# Altium footprint library Electromechanicals.PcbLib: 25 footprints (part 2 of 2)
Each footprint in its own frame and in the unit in brackets; x right, y up, seen from the top. Pads: shape width x height; smd on the part's side, far side on the other; paste and mask are expansions set on the pad; w line width, h text height; cw(c..) or ccw(c..) is an arc to the next point about the centre after c.
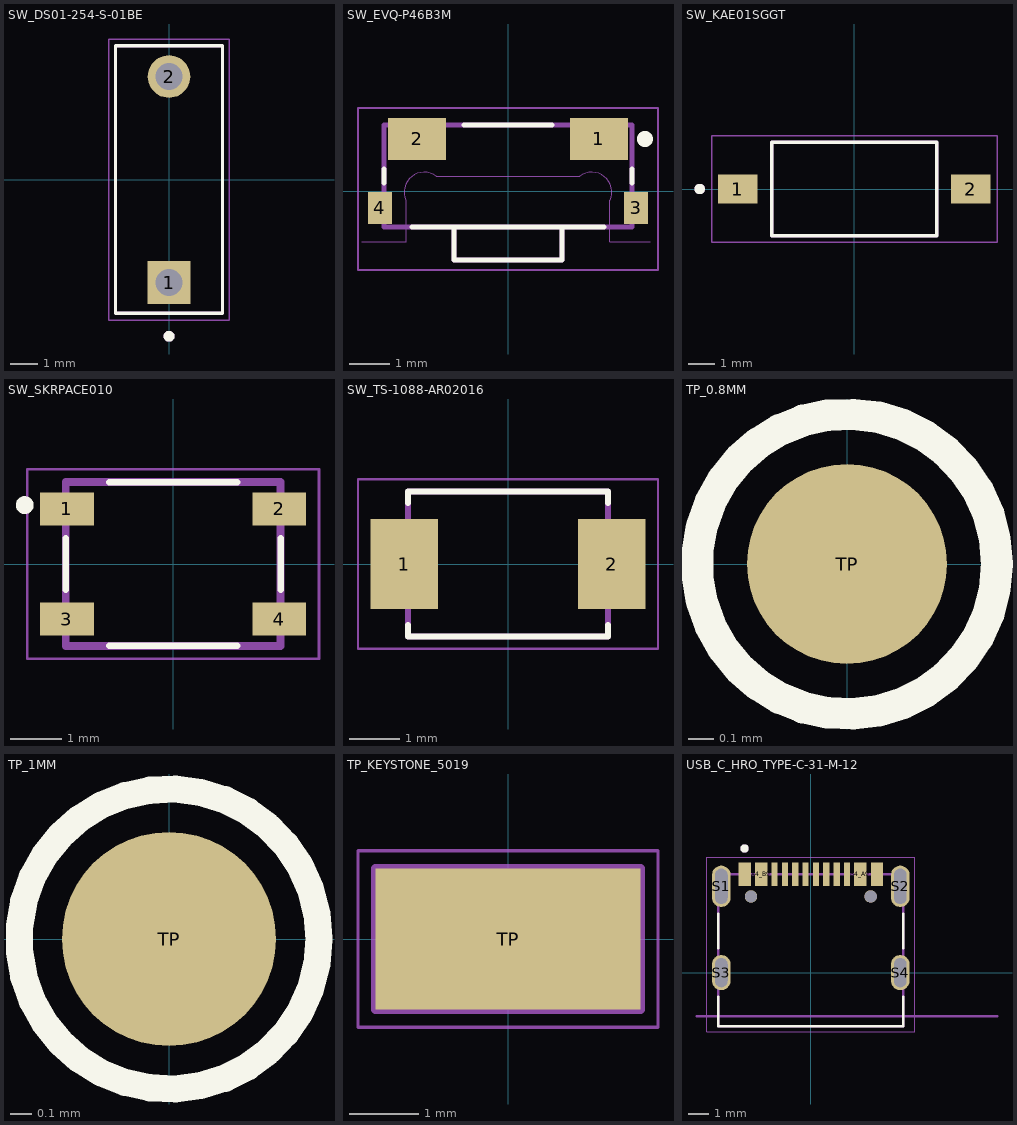
[diagram p1: the footprints below, top view; thin cyan lines are the x and y axes]

## SW_DS01-254-S-01BE [mm]
height 7
pads (2):
  rect 1.58x1.58 / inner round 1.58 / far side rect 1.58x1.58 hole 1: 1(0,-3.81)
  round 1.58 hole 1: 2(0,3.81)
Top Overlay:
  circle w0.2: c0,-5.8 r0.1
  lines w0.127: -1.98,-4.95 1.98,-4.95 1.98,4.95 -1.98,4.95 -1.98,-4.95
Mechanical 13:
  circle w0.2: c0,-5.8 r0.1
  lines w0.127: -1.98,-4.95 1.98,-4.95 1.98,4.95 -1.98,4.95 -1.98,-4.95
Mechanical 15:
  lines w0.05: -2.23,-5.2 2.23,-5.2 2.23,5.2 -2.23,5.2 -2.23,-5.2
3D body "step_temp.STEP": height 6.56, standoff -2.99, extent -1.98,-4.95 1.98,4.95

## SW_EVQ-P46B3M [mm]
pads (4):
  rect 1.45x1.05 smd: 1(2.275,1.305) 2(-2.275,1.305)
  rect 0.6x0.8 smd: 3(3.2,-0.42) 4(-3.2,-0.42)
Top Overlay:
  circle w0.2: c3.424,1.305 r0.1
  lines w0.127: -3.1,0.205 -3.1,0.555 ; -2.4,-0.895 2.4,-0.895 ; -1.35,-0.945 -1.35,-1.72 1.35,-1.72 1.35,-0.945 ; -1.1,1.655 1.1,1.655 ; 3.1,0.205 3.1,0.555
Mechanical 1:
  lines w0.01: -3.65,-1.27 -2.55,-1.27 -2.55,-0.23 ; -2.55,-0.229 cw(c-2.093,-0.025) -1.799,0.379 1.8,0.38 cw(c2.093,-0.025) 2.55,-0.229 ; 2.55,-0.23 2.55,-1.27 3.55,-1.27
Mechanical 13:
  lines w0.127: -1.35,-0.895 -1.35,-1.72 1.35,-1.72 1.35,-0.895 ; -3.1,-0.895 -3.1,1.655 3.1,1.655 3.1,-0.895 -3.1,-0.895
Mechanical 15:
  lines w0.05: -3.75,-1.97 -3.75,2.08 3.75,2.08 3.75,-1.97 -3.75,-1.97

## SW_KAE01SGGT [mm]
height 3.13
pads (2):
  rect 1.5x1.1 smd: 1(-4.45,0) 2(4.45,0)
Top Overlay:
  circle w0.2: c-5.91,0 r0.1
  lines w0.127: -3.15,-1.79 3.15,-1.79 3.15,1.79 -3.15,1.79 -3.15,-1.79
Mechanical 13:
  circle w0.2: c-5.91,0 r0.1
  lines w0.127: -3.15,-1.79 3.15,-1.79 3.15,1.79 -3.15,1.79 -3.15,-1.79
Mechanical 15:
  lines w0.05: -5.45,-2.04 5.45,-2.04 5.45,2.04 -5.45,2.04 -5.45,-2.04
3D body "step_temp.STEP": height 3.13, standoff 0, extent -4.9,-1.79 4.9,1.79

## SW_SKRPACE010 [mm]
pads (4):
  rect 1.05x0.65 smd: 1(-2.075,1.075) 2(2.075,1.075) 3(-2.075,-1.075) 4(2.075,-1.075)
Top Overlay:
  circle w0.127: c-2.85,1.15 r0.05
  circle w0.127: c-2.9,1.15 r0.112
  lines w0.127: -2.1,-0.5 -2.1,0.5 ; -1.25,-1.6 1.25,-1.6 ; -1.25,1.6 1.25,1.6 ; 2.1,-0.5 2.1,0.5
Mechanical 13:
  lines w0.152: -2.1,-1.6 -2.1,1.6 2.1,1.6 2.1,-1.6 -2.1,-1.6
Mechanical 15:
  lines w0.05: -2.85,-1.85 -2.85,1.85 2.85,1.85 2.85,-1.85 -2.85,-1.85

## SW_TS-1088-AR02016 [mm]
height 2
pads (2):
  rect 1.35x1.8 smd: 1(-2.075,0) 2(2.075,0)
Top Overlay:
  lines w0.127: -2,-1.22 -2,-1.45 2,-1.45 2,-1.22 ; -2,1.22 -2,1.45 2,1.45 2,1.22
Mechanical 13:
  lines w0.127: -2,-1.45 -2,1.45 2,1.45 2,-1.45 -2,-1.45
Mechanical 15:
  lines w0.05: -3,-1.7 3,-1.7 3,1.7 -3,1.7 -3,-1.7
3D body "step_temp.STEP": height 2, standoff 0, extent -2.4,-1.45 2.4,1.45

## TP_0.8MM [mm]
height 2.29
pads (1):
  round 0.8 smd: TP(0,0)
Top Overlay:
  circle w0.127: c0,0 r0.6

## TP_1MM [mm]
height 2.29
pads (1):
  round 1 smd: TP(0,0)
Top Overlay:
  circle w0.127: c0,0 r0.7

## TP_KEYSTONE_5019 [mm]
height 2.29
pads (1):
  rect 3.8x2.03 smd: TP(0,0)
Mechanical 13:
  lines w0.127: -1.905,-1.015 -1.905,1.015 1.905,1.015 1.905,-1.015 -1.905,-1.015
Mechanical 15:
  lines w0.05: -2.155,-1.265 -2.155,1.265 2.155,1.265 2.155,-1.265 -2.155,-1.265
3D body "step_temp.STEP": height 2.3, standoff 0.01, extent -1.905,-1.015 1.905,1.015

## USB_C_HRO_TYPE-C-31-M-12 [mm]
height 3.26
pads (18):
  rect 0.6x1.14 smd mask+0.05: A1_B12(-3.2,4.75) A4_B9(-2.4,4.75) B1_A12(3.2,4.75) B4_A9(2.4,4.75)
  rect 0.3x1.14 smd mask+0.05: A5(-1.25,4.75) A6(-0.25,4.75) A7(0.25,4.75) A8(1.25,4.75) B5(1.75,4.75) B6(0.75,4.75) B7(-0.75,4.75) B8(-1.75,4.75)
  oval 0.9x2 hole 0.6 slot 1.7 at 90 deg: S1(-4.325,4.17) S2(4.325,4.17)
  oval 0.9x1.7 hole 0.6 slot 1.4 at 90 deg: S3(-4.325,0) S4(4.325,0)
  round 0.6 hole 0.6 unplated: ""(-2.89,3.68) ""(2.89,3.68)
Top Overlay:
  circle w0.2: c-3.2,6 r0.1
  lines w0.127: -4.47,-1.17 -4.47,-2.6 4.47,-2.6 4.47,-1.17 ; -4.47,1.17 -4.47,2.85 ; 4.47,1.17 4.47,2.85
Mechanical 13:
  circle w0.2: c-3.2,6 r0.1
  lines w0.127: -5.5,-2.11 9,-2.11 ; -4.47,-2.6 4.47,-2.6 4.47,4.75 -4.47,4.75 -4.47,-2.6
  text "PCB EDGE" at 5.2,-1.9 h0.61
Mechanical 15:
  lines w0.05: -5.025,-2.85 -5.025,5.57 5.025,5.57 5.025,-2.85 -5.025,-2.85
3D body "step_temp.STEP": height 3.31, standoff -0.99, extent -4.47,-2.6 4.47,5.305